# Altium schematic symbol library ADC.SchLib: 9 symbols
Pins are listed as number, name and electrical type; pins without a type are passive.

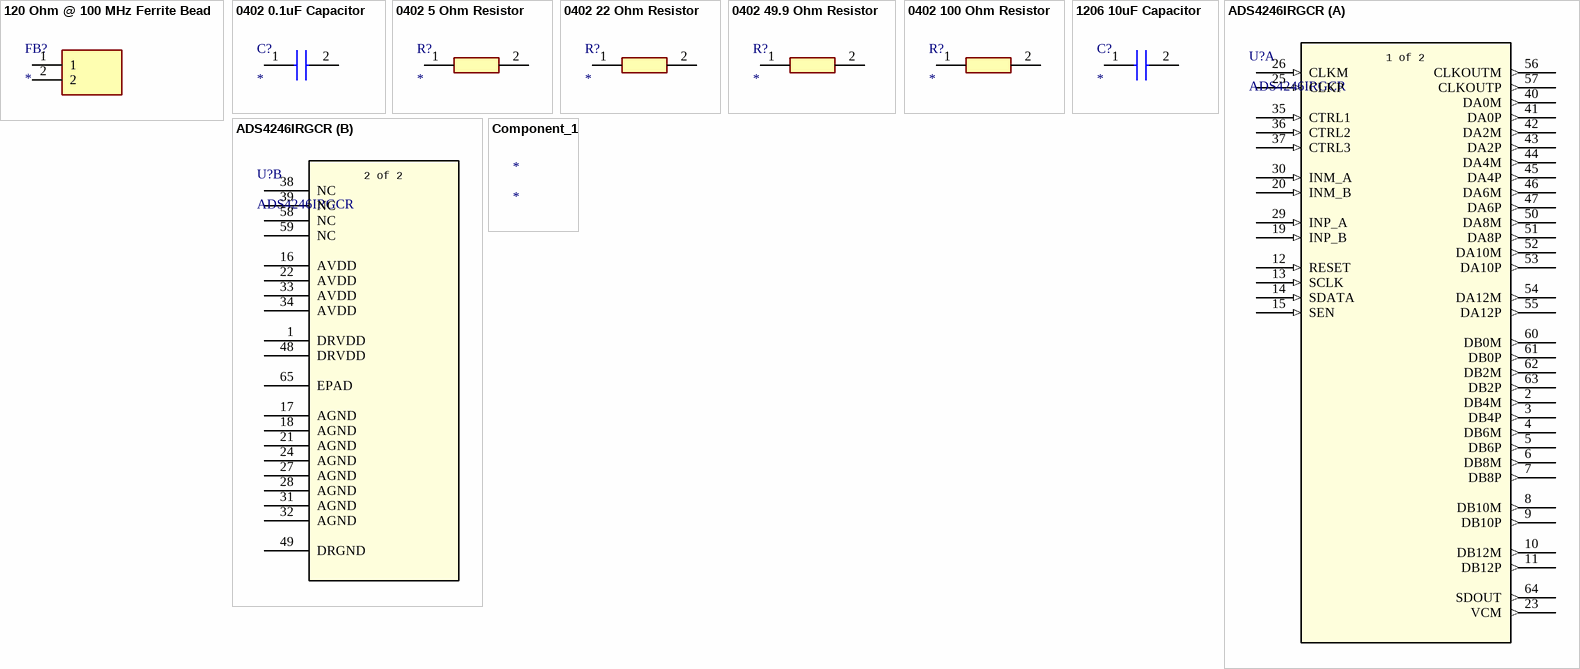
[diagram p0: symbols 120 Ohm @ 100 MHz Ferrite Bead to Component_1]

## 120 Ohm @ 100 MHz Ferrite Bead
designator FB?
BLM18PG121SN1D; Manufacturer_Name: Murata Electronics; Datasheet Link: http://www.murata.com/~/media/webrenewal/support/library/catalog/products/emc/emifil/c31e.ashx?la=en-gb; Height: 0.95mm; Manufacturer_Part_Number: BLM18PG121SN1D; Mouser Part Number: 81-BLM18PG121SN1D; Mouser Price/Stock: https://www.mouser.co.uk/ProductDetail/Murata-Electronics/BLM18PG121SN1D?qs=tY8e8KZalarVxhnmnUYZ1A%3D%3D; Arrow Part Number: BLM18PG121SN1D; Arrow Price/Stock: https://www.arrow.com/en/products/blm18pg121sn1d/murata-manufacturing.html?utm_currency=USD&region=europe
footprint BLM18SP221SN1B
pins: 1, 2

## 0402 0.1uF Capacitor
designator C?
C0402C104K4RACTU; Manufacturer_Name: Yageo Group; Datasheet Link: https://content.kemet.com/datasheets/KEM_C1002_X7R_SMD.pdf; Height: 0.55mm; Manufacturer_Part_Number: C0402C104K4RACTU; Mouser Part Number: 80-C0402C104K4R; Mouser Price/Stock: https://www.mouser.co.uk/ProductDetail/KEMET/C0402C104K4RACTU?qs=DBJr%252BvBUjU54jK7d4uAeew%3D%3D; Arrow Part Number: C0402C104K4RACTU; Arrow Price/Stock: https://www.arrow.com/en/products/c0402c104k4ractu/kemet-corporation.html?utm_currency=USD&region=nac
footprint C0402C104J4RACTU
pins: 1, 2

## 0402 5 Ohm Resistor
designator R?
RC0402FR-075R1L; Manufacturer_Name: Yageo Group; Datasheet Link: https://yageogroup.com/component-documentation/download/specsheet/RC0402FR-075R1L?lang=en; Height: 0.4mm; Manufacturer_Part_Number: RC0402FR-075R1L; Mouser Part Number: 603-RC0402FR-075R1L; Mouser Price/Stock: https://www.mouser.co.uk/ProductDetail/YAGEO/RC0402FR-075R1L?qs=beCmh%2FXShNcKHNb5Mim9zw%3D%3D; Arrow Part Number: RC0402FR-075R1L; Arrow Price/Stock: https://www.arrow.com/en/products/rc0402fr-075r1l/yageo?region=nac
footprint RESC1005X40N
pins: 1, 2

## 0402 22 Ohm Resistor
designator R?
RC0402FR-0722RL; Manufacturer_Name: Yageo Group; Datasheet Link: https://yageogroup.com/products/Resistors/part/RC0402FR-0722RL; Height: 0.4mm; Manufacturer_Part_Number: RC0402FR-0722RL; Mouser Part Number: 603-RC0402FR-0722RL; Mouser Price/Stock: https://www.mouser.co.uk/ProductDetail/YAGEO/RC0402FR-0722RL?qs=V1yeUXFNrkkRg6zf08ADKQ%3D%3D; Arrow Part Number: RC0402FR-0722RL; Arrow Price/Stock: https://www.arrow.com/en/products/rc0402fr-0722rl/yageo
footprint RESC1005X40N
pins: 1, 2

## 0402 49.9 Ohm Resistor
designator R?
RC0402FR-0749R9L; Manufacturer_Name: Yageo Group; Datasheet Link: https://www.yageo.com/upload/media/product/productsearch/datasheet/rchip/PYu-RC_Group_51_RoHS_L_12.pdf; Height: 0.4mm; Manufacturer_Part_Number: RC0402FR-0749R9L; Mouser Part Number: 603-RC0402FR-0749R9L; Mouser Price/Stock: https://www.mouser.co.uk/ProductDetail/YAGEO/RC0402FR-0749R9L?qs=lywS2nZzkrJ8zCaO%252B%252Bic5Q%3D%3D; Arrow Part Number: RC0402FR-0749R9L; Arrow Price/Stock: https://www.arrow.com/en/products/rc0402fr-0749r9l/yageo?region=nac
footprint RESC1005X40N
pins: 1, 2

## 0402 100 Ohm Resistor
designator R?
AC0402FR-07100RL; Manufacturer_Name: Yageo Group; Datasheet Link: https://www.arrow.com/en/products/ac0402fr-07100rl/yageo?region=nac; Height: 0.37mm; Manufacturer_Part_Number: AC0402FR-07100RL; Mouser Part Number: 603-AC0402FR-07100RL; Mouser Price/Stock: https://www.mouser.co.uk/ProductDetail/YAGEO/AC0402FR-07100RL?qs=yhV1fb9g%2FKaIIQxJBW5mdg%3D%3D; Arrow Part Number: AC0402FR-07100RL; Arrow Price/Stock: https://www.arrow.com/en/products/ac0402fr-07100rl/yageo?region=nac
footprint RESC1005X37N
pins: 1, 2

## 1206 10uF Capacitor
designator C?
C1206X106M3RACAUTO; Manufacturer_Name: Yageo Group; Datasheet Link: https://www.yageogroup.com/content/datasheet/asset/file/KEM_C1078_X7R_FT-CAP_AUTO_SMD; Manufacturer_Part_Number: C1206X106M3RACAUTO; Mouser Part Number: 80-C1206X106M3RAUTO; Mouser Price/Stock: https://www.mouser.co.uk/ProductDetail/KEMET/C1206X106M3RACAUTO?qs=HXFqYaX1Q2xSroSoadzbnw%3D%3D; Arrow Part Number: C1206X106M3RACAUTO; Arrow Price/Stock: https://www.arrow.com/en/products/c1206x106m3racauto/kemet-corporation?utm_currency=USD&region=nac
footprint C1206_FT
pins: 1, 2

## ADS4246IRGCR
designator U?
Dual-Channel, 14-Bit, 160-MSPS Analog-to-Digital Converter (ADC) 64-VQFN -40 to 85; Manufacturer_Name: Texas Instruments; Copyright: Copyright (C) 2026 Ultra Librarian. All rights reserved.; Manufacturer_Part_Number: ADS4246IRGCR; Datasheet: https://www.ti.com/lit/gpn/ads4246; RefDes: RefDes; Type: Type
footprint RGC64_7P4X7P4
part A pins: 2 DB4M (out), 3 DB4P (out), 4 DB6M (out), 5 DB6P (out), 6 DB8M (out), 7 DB8P (out), 8 DB10M (out), 9 DB10P (out), 10 DB12M (out), 11 DB12P (out), 12 RESET (in), 13 SCLK (in), 14 SDATA (in), 15 SEN (in), 19 INP_B (in), 20 INM_B (in), 23 VCM (out), 25 CLKP (in), 26 CLKM (in), 29 INP_A (in), 30 INM_A (in), 35 CTRL1 (in), 36 CTRL2 (in), 37 CTRL3 (in), 40 DA0M (out), 41 DA0P (out), 42 DA2M (out), 43 DA2P (out), 44 DA4M (out), 45 DA4P (out), 46 DA6M (out), 47 DA6P (out), 50 DA8M (out), 51 DA8P (out), 52 DA10M (out), 53 DA10P (out), 54 DA12M (out), 55 DA12P (out), 56 CLKOUTM (out), 57 CLKOUTP (out), 60 DB0M (out), 61 DB0P (out), 62 DB2M (out), 63 DB2P (out), 64 SDOUT (out)
part B pins: 1 DRVDD (power), 16 AVDD (power), 17 AGND (power), 18 AGND (power), 21 AGND (power), 22 AVDD (power), 24 AGND (power), 27 AGND (power), 28 AGND (power), 31 AGND (power), 32 AGND (power), 33 AVDD (power), 34 AVDD (power), 38 NC, 39 NC, 48 DRVDD (power), 49 DRGND (power), 58 NC, 59 NC, 65 EPAD (power)
part A text: 1 of 2
part B text: 2 of 2

## Component_1
designator *